# Altium footprint library Package_BGA.PcbLib: 230 footprints (part 11 of 28)
Each footprint in its own frame and in the unit in brackets; x right, y up, seen from the top. Pads: shape width x height; smd on the part's side, far side on the other; paste and mask are expansions set on the pad; w line width, h text height; cw(c..) or ccw(c..) is an arc to the next point about the centre after c.
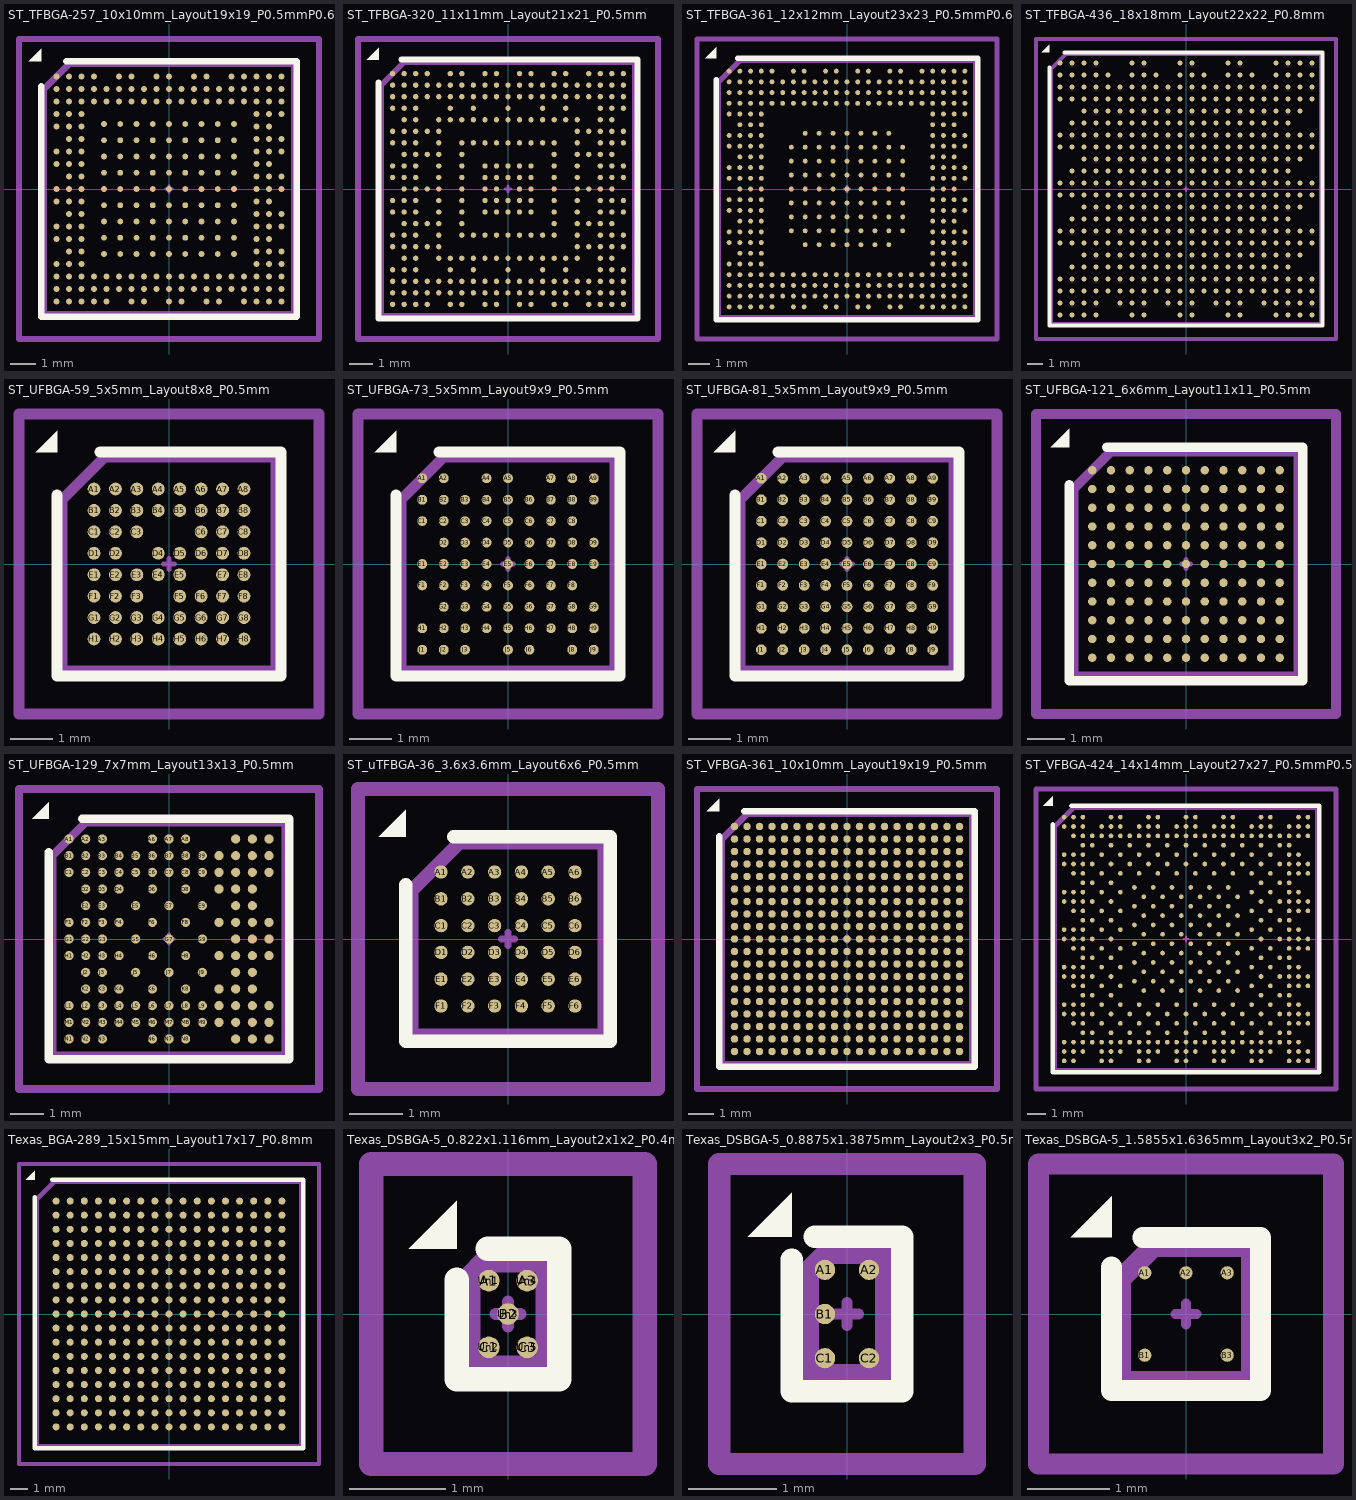
[diagram p10: the footprints below, top view; thin cyan lines are the x and y axes]

## ST_TFBGA-257_10x10mm_Layout19x19_P0.5mmP0.65mm [mm] "ST_TFBGA-257_10x10mm_Layout19x19_P0.5mmP0.65mm"
pads (257):
  round 0.23 smd: 1A1(-2.6,2.6) 1A2(-1.95,2.6) 1A3(-1.3,2.6) 1A4(-0.65,2.6) 1A5(0,2.6) 1A6(0.65,2.6) 1A7(1.3,2.6) 1A8(1.95,2.6) 1A9(2.6,2.6) 1B1(-2.6,1.95) 1B2(-1.95,1.95) 1B3(-1.3,1.95) 1B4(-0.65,1.95) 1B5(0,1.95) 1B6(0.65,1.95) 1B7(1.3,1.95) 1B8(1.95,1.95) 1B9(2.6,1.95) 1C1(-2.6,1.3) 1C2(-1.95,1.3) 1C3(-1.3,1.3) 1C4(-0.65,1.3) 1C5(0,1.3) 1C6(0.65,1.3) 1C7(1.3,1.3) 1C8(1.95,1.3) 1C9(2.6,1.3) 1D1(-2.6,0.65) 1D2(-1.95,0.65) 1D3(-1.3,0.65) 1D4(-0.65,0.65) 1D5(0,0.65) 1D6(0.65,0.65) 1D7(1.3,0.65) 1D8(1.95,0.65) 1D9(2.6,0.65) 1E1(-2.6,0) 1E2(-1.95,0) 1E3(-1.3,0) 1E4(-0.65,0) 1E5(0,0) 1E6(0.65,0) 1E7(1.3,0) 1E8(1.95,0) 1E9(2.6,0) 1F1(-2.6,-0.65) 1F2(-1.95,-0.65) 1F3(-1.3,-0.65) 1F4(-0.65,-0.65) 1F5(0,-0.65) 1F6(0.65,-0.65) 1F7(1.3,-0.65) 1F8(1.95,-0.65) 1F9(2.6,-0.65) 1G1(-2.6,-1.3) 1G2(-1.95,-1.3) 1G3(-1.3,-1.3) 1G4(-0.65,-1.3) 1G5(0,-1.3) 1G6(0.65,-1.3) 1G7(1.3,-1.3) 1G8(1.95,-1.3) 1G9(2.6,-1.3) 1H1(-2.6,-1.95) 1H2(-1.95,-1.95) 1H3(-1.3,-1.95) 1H4(-0.65,-1.95) 1H5(0,-1.95) 1H6(0.65,-1.95) 1H7(1.3,-1.95) 1H8(1.95,-1.95) 1H9(2.6,-1.95) 1J1(-2.6,-2.6) 1J2(-1.95,-2.6) 1J3(-1.3,-2.6) 1J4(-0.65,-2.6) 1J5(0,-2.6) 1J6(0.65,-2.6) 1J7(1.3,-2.6) 1J8(1.95,-2.6) 1J9(2.6,-2.6) A1(-4.5,4.5) A2(-4,4.5) A3(-3.5,4.5) A4(-3,4.5) A6(-2,4.5) A7(-1.5,4.5) A9(-0.5,4.5) A10(0,4.5) A12(1,4.5) A13(1.5,4.5) A15(2.5,4.5) A16(3,4.5) A17(3.5,4.5) A18(4,4.5) A19(4.5,4.5) B1(-4.5,4) B2(-4,4) B3(-3.5,4) B4(-3,4) B5(-2.5,4) B6(-2,4) B7(-1.5,4) B8(-1,4) B9(-0.5,4) B10(0,4) B11(0.5,4) B12(1,4) B13(1.5,4) B14(2,4) B15(2.5,4) B16(3,4) B17(3.5,4) B18(4,4) B19(4.5,4) C1(-4.5,3.5) C2(-4,3.5) C3(-3.5,3.5) C4(-3,3.5) C5(-2.5,3.5) C6(-2,3.5) C7(-1.5,3.5) C8(-1,3.5) C9(-0.5,3.5) C10(0,3.5) C11(0.5,3.5) C12(1,3.5) C13(1.5,3.5) C14(2,3.5) C15(2.5,3.5) C16(3,3.5) C17(3.5,3.5) C18(4,3.5) C19(4.5,3.5) D1(-4.5,3) D2(-4,3) D3(-3.5,3) D17(3.5,3) D18(4,3) D19(4.5,3) E1(-4.5,2.5) E2(-4,2.5) E3(-3.5,2.5) E17(3.5,2.5) E18(4,2.5) F2(-4,2) F3(-3.5,2) F17(3.5,2) F18(4,2) F19(4.5,2) G1(-4.5,1.5) G2(-4,1.5) G3(-3.5,1.5) G17(3.5,1.5) G18(4,1.5) G19(4.5,1.5) H1(-4.5,1) H2(-4,1) H3(-3.5,1) H17(3.5,1) H18(4,1) J2(-4,0.5) J3(-3.5,0.5) J17(3.5,0.5) J18(4,0.5) J19(4.5,0.5) K1(-4.5,0) K2(-4,0) K3(-3.5,0) K17(3.5,0) K18(4,0) K19(4.5,0) L1(-4.5,-0.5) L2(-4,-0.5) L3(-3.5,-0.5) L17(3.5,-0.5) L18(4,-0.5) M2(-4,-1) M3(-3.5,-1) M17(3.5,-1) M18(4,-1) M19(4.5,-1) N1(-4.5,-1.5) N2(-4,-1.5) N3(-3.5,-1.5) N17(3.5,-1.5) N18(4,-1.5) N19(4.5,-1.5) P1(-4.5,-2) P2(-4,-2) P3(-3.5,-2) P17(3.5,-2) P18(4,-2) R2(-4,-2.5) R3(-3.5,-2.5) R17(3.5,-2.5) R18(4,-2.5) R19(4.5,-2.5) T1(-4.5,-3) T2(-4,-3) T3(-3.5,-3) T17(3.5,-3) T18(4,-3) T19(4.5,-3) U1(-4.5,-3.5) U2(-4,-3.5) U3(-3.5,-3.5) U4(-3,-3.5) U5(-2.5,-3.5) U6(-2,-3.5) U7(-1.5,-3.5) U8(-1,-3.5) U9(-0.5,-3.5) U10(0,-3.5) U11(0.5,-3.5) U12(1,-3.5) U13(1.5,-3.5) U14(2,-3.5) U15(2.5,-3.5) U16(3,-3.5) U17(3.5,-3.5) U18(4,-3.5) U19(4.5,-3.5) V1(-4.5,-4) V2(-4,-4) V3(-3.5,-4) V4(-3,-4) V5(-2.5,-4) V6(-2,-4) V7(-1.5,-4) V8(-1,-4) V9(-0.5,-4) V10(0,-4) V11(0.5,-4) V12(1,-4) V13(1.5,-4) V14(2,-4) V15(2.5,-4) V16(3,-4) V17(3.5,-4) V18(4,-4) V19(4.5,-4) W1(-4.5,-4.5) W2(-4,-4.5) W3(-3.5,-4.5) W4(-3,-4.5) W5(-2.5,-4.5) W7(-1.5,-4.5) W8(-1,-4.5) W10(0,-4.5) W11(0.5,-4.5) W13(1.5,-4.5) W14(2,-4.5) W16(3,-4.5) W17(3.5,-4.5) W18(4,-4.5) W19(4.5,-4.5)
F.SilkS:
  region: -5.11,5.11 -5.61,5.11 -5.11,5.61
  lines w0.254: -5.11,4.11 -5.11,-5.11 5.11,-5.11 5.11,5.11 -4.11,5.11
Top Component Center:
  lines w0.127: -0.127,0 0.127,0 -0.127,0 ; 0,-0.127 0,0.127 0,-0.127
Top Assembly:
  lines w0.254: -5,-5 -5,4 -4,5 5,5 5,-5 -5,-5
Top Courtyard:
  lines w0.254: -6,-6 -6,6 6,6 6,-6 -6,-6
Top Designator:
  text ".Designator" at -3.432,-0.345 h1.52

## ST_TFBGA-320_11x11mm_Layout21x21_P0.5mm [mm] "ST_TFBGA-320_11x11mm_Layout21x21_P0.5mm"
pads (320):
  round 0.23 smd: A1(-5,5) A2(-4.5,5) A3(-4,5) A4(-3.5,5) A6(-2.5,5) A7(-2,5) A9(-1,5) A10(-0.5,5) A12(0.5,5) A13(1,5) A15(2,5) A16(2.5,5) A18(3.5,5) A19(4,5) A20(4.5,5) A21(5,5) AA1(-5,-5) AA2(-4.5,-5) AA3(-4,-5) AA4(-3.5,-5) AA6(-2.5,-5) AA7(-2,-5) AA9(-1,-5) AA10(-0.5,-5) AA12(0.5,-5) AA13(1,-5) AA15(2,-5) AA16(2.5,-5) AA18(3.5,-5) AA19(4,-5) AA20(4.5,-5) AA21(5,-5) B1(-5,4.5) B2(-4.5,4.5) B3(-4,4.5) B4(-3.5,4.5) B5(-3,4.5) B6(-2.5,4.5) B7(-2,4.5) B8(-1.5,4.5) B9(-1,4.5) B10(-0.5,4.5) B11(0,4.5) B12(0.5,4.5) B13(1,4.5) B14(1.5,4.5) B15(2,4.5) B16(2.5,4.5) B17(3,4.5) B18(3.5,4.5) B19(4,4.5) B20(4.5,4.5) B21(5,4.5) C1(-5,4) C2(-4.5,4) C3(-4,4) C4(-3.5,4) C5(-3,4) C6(-2.5,4) C7(-2,4) C8(-1.5,4) C9(-1,4) C10(-0.5,4) C11(0,4) C12(0.5,4) C13(1,4) C14(1.5,4) C15(2,4) C16(2.5,4) C17(3,4) C18(3.5,4) C19(4,4) C20(4.5,4) C21(5,4) D1(-5,3.5) D2(-4.5,3.5) D3(-4,3.5) D6(-2.5,3.5) D8(-1.5,3.5) D11(0,3.5) D14(1.5,3.5) D16(2.5,3.5) D19(4,3.5) D20(4.5,3.5) D21(5,3.5) E2(-4.5,3) E3(-4,3) E5(-3,3) E6(-2.5,3) E7(-2,3) E8(-1.5,3) E9(-1,3) E10(-0.5,3) E11(0,3) E12(0.5,3) E13(1,3) E14(1.5,3) E15(2,3) E16(2.5,3) E17(3,3) E19(4,3) E20(4.5,3) F1(-5,2.5) F2(-4.5,2.5) F3(-4,2.5) F4(-3.5,2.5) F5(-3,2.5) F17(3,2.5) F18(3.5,2.5) F19(4,2.5) F20(4.5,2.5) F21(5,2.5) G1(-5,2) G2(-4.5,2) G3(-4,2) G5(-3,2) G7(-2,2) G8(-1.5,2) G9(-1,2) G10(-0.5,2) G11(0,2) G12(0.5,2) G13(1,2) G14(1.5,2) G15(2,2) G17(3,2) G19(4,2) G20(4.5,2) G21(5,2) H2(-4.5,1.5) H3(-4,1.5) H4(-3.5,1.5) H5(-3,1.5) H7(-2,1.5) H15(2,1.5) H17(3,1.5) H18(3.5,1.5) H19(4,1.5) H20(4.5,1.5) J1(-5,1) J2(-4.5,1) J3(-4,1) J5(-3,1) J7(-2,1) J9(-1,1) J10(-0.5,1) J11(0,1) J12(0.5,1) J13(1,1) J15(2,1) J17(3,1) J19(4,1) J20(4.5,1) J21(5,1) K1(-5,0.5) K2(-4.5,0.5) K3(-4,0.5) K5(-3,0.5) K7(-2,0.5) K9(-1,0.5) K10(-0.5,0.5) K11(0,0.5) K12(0.5,0.5) K13(1,0.5) K15(2,0.5) K17(3,0.5) K19(4,0.5) K20(4.5,0.5) K21(5,0.5) L2(-4.5,0) L3(-4,0) L4(-3.5,0) L5(-3,0) L7(-2,0) L9(-1,0) L10(-0.5,0) L12(0.5,0) L13(1,0) L15(2,0) L17(3,0) L18(3.5,0) L19(4,0) L20(4.5,0) M1(-5,-0.5) M2(-4.5,-0.5) M3(-4,-0.5) M5(-3,-0.5) M7(-2,-0.5) M9(-1,-0.5) M10(-0.5,-0.5) M11(0,-0.5) M12(0.5,-0.5) M13(1,-0.5) M15(2,-0.5) M17(3,-0.5) M19(4,-0.5) M20(4.5,-0.5) M21(5,-0.5) N1(-5,-1) N2(-4.5,-1) N3(-4,-1) N5(-3,-1) N7(-2,-1) N9(-1,-1) N10(-0.5,-1) N11(0,-1) N12(0.5,-1) N13(1,-1) N15(2,-1) N17(3,-1) N19(4,-1) N20(4.5,-1) N21(5,-1) P2(-4.5,-1.5) P3(-4,-1.5) P4(-3.5,-1.5) P5(-3,-1.5) P7(-2,-1.5) P15(2,-1.5) P17(3,-1.5) P18(3.5,-1.5) P19(4,-1.5) P20(4.5,-1.5) R1(-5,-2) R2(-4.5,-2) R3(-4,-2) R5(-3,-2) R7(-2,-2) R8(-1.5,-2) R9(-1,-2) R10(-0.5,-2) R11(0,-2) R12(0.5,-2) R13(1,-2) R14(1.5,-2) R15(2,-2) R17(3,-2) R19(4,-2) R20(4.5,-2) R21(5,-2) T1(-5,-2.5) T2(-4.5,-2.5) T3(-4,-2.5) T4(-3.5,-2.5) T5(-3,-2.5) T17(3,-2.5) T18(3.5,-2.5) T19(4,-2.5) T20(4.5,-2.5) T21(5,-2.5) U2(-4.5,-3) U3(-4,-3) U5(-3,-3) U6(-2.5,-3) U7(-2,-3) U8(-1.5,-3) U9(-1,-3) U10(-0.5,-3) U11(0,-3) U12(0.5,-3) U13(1,-3) U14(1.5,-3) U15(2,-3) U16(2.5,-3) U17(3,-3) U19(4,-3) U20(4.5,-3) V1(-5,-3.5) V2(-4.5,-3.5) V3(-4,-3.5) V6(-2.5,-3.5) V8(-1.5,-3.5) V11(0,-3.5) V14(1.5,-3.5) V16(2.5,-3.5) V19(4,-3.5) V20(4.5,-3.5) V21(5,-3.5) W1(-5,-4) W2(-4.5,-4) W3(-4,-4) W4(-3.5,-4) W5(-3,-4) W6(-2.5,-4) W7(-2,-4) W8(-1.5,-4) W9(-1,-4) W10(-0.5,-4) W11(0,-4) W12(0.5,-4) W13(1,-4) W14(1.5,-4) W15(2,-4) W16(2.5,-4) W17(3,-4) W18(3.5,-4) W19(4,-4) W20(4.5,-4) W21(5,-4) Y1(-5,-4.5) Y2(-4.5,-4.5) Y3(-4,-4.5) Y4(-3.5,-4.5) Y5(-3,-4.5) Y6(-2.5,-4.5) Y7(-2,-4.5) Y8(-1.5,-4.5) Y9(-1,-4.5) Y10(-0.5,-4.5) Y11(0,-4.5) Y12(0.5,-4.5) Y13(1,-4.5) Y14(1.5,-4.5) Y15(2,-4.5) Y16(2.5,-4.5) Y17(3,-4.5) Y18(3.5,-4.5) Y19(4,-4.5) Y20(4.5,-4.5) Y21(5,-4.5)
F.SilkS:
  region: -5.61,5.61 -6.11,5.61 -5.61,6.11
  lines w0.254: -5.61,4.61 -5.61,-5.61 5.61,-5.61 5.61,5.61 -4.61,5.61
Top Component Center:
  lines w0.127: -0.127,0 0.127,0 -0.127,0 ; 0,-0.127 0,0.127 0,-0.127
Top Assembly:
  lines w0.254: -5.5,-5.5 -5.5,4.5 -4.5,5.5 5.5,5.5 5.5,-5.5 -5.5,-5.5
Top Courtyard:
  lines w0.254: -6.5,-6.5 -6.5,6.5 6.5,6.5 6.5,-6.5 -6.5,-6.5
Top Designator:
  text ".Designator" at -3.432,-0.345 h1.52

## ST_TFBGA-361_12x12mm_Layout23x23_P0.5mmP0.65mm [mm] "ST_TFBGA-361_12x12mm_Layout23x23_P0.5mmP0.65mm"
pads (361):
  round 0.23 smd: 1A2(-1.95,2.6) 1A3(-1.3,2.6) 1A4(-0.65,2.6) 1A5(0,2.6) 1A6(0.65,2.6) 1A7(1.3,2.6) 1A8(1.95,2.6) 1B1(-2.6,1.95) 1B2(-1.95,1.95) 1B3(-1.3,1.95) 1B4(-0.65,1.95) 1B5(0,1.95) 1B6(0.65,1.95) 1B7(1.3,1.95) 1B8(1.95,1.95) 1B9(2.6,1.95) 1C1(-2.6,1.3) 1C2(-1.95,1.3) 1C3(-1.3,1.3) 1C4(-0.65,1.3) 1C5(0,1.3) 1C6(0.65,1.3) 1C7(1.3,1.3) 1C8(1.95,1.3) 1C9(2.6,1.3) 1D1(-2.6,0.65) 1D2(-1.95,0.65) 1D3(-1.3,0.65) 1D4(-0.65,0.65) 1D5(0,0.65) 1D6(0.65,0.65) 1D7(1.3,0.65) 1D8(1.95,0.65) 1D9(2.6,0.65) 1E1(-2.6,0) 1E2(-1.95,0) 1E3(-1.3,0) 1E4(-0.65,0) 1E5(0,0) 1E6(0.65,0) 1E7(1.3,0) 1E8(1.95,0) 1E9(2.6,0) 1F1(-2.6,-0.65) 1F2(-1.95,-0.65) 1F3(-1.3,-0.65) 1F4(-0.65,-0.65) 1F5(0,-0.65) 1F6(0.65,-0.65) 1F7(1.3,-0.65) 1F8(1.95,-0.65) 1F9(2.6,-0.65) 1G1(-2.6,-1.3) 1G2(-1.95,-1.3) 1G3(-1.3,-1.3) 1G4(-0.65,-1.3) 1G5(0,-1.3) 1G6(0.65,-1.3) 1G7(1.3,-1.3) 1G8(1.95,-1.3) 1G9(2.6,-1.3) 1H1(-2.6,-1.95) 1H2(-1.95,-1.95) 1H3(-1.3,-1.95) 1H4(-0.65,-1.95) 1H5(0,-1.95) 1H6(0.65,-1.95) 1H7(1.3,-1.95) 1H8(1.95,-1.95) 1H9(2.6,-1.95) 1J2(-1.95,-2.6) 1J3(-1.3,-2.6) 1J4(-0.65,-2.6) 1J5(0,-2.6) 1J6(0.65,-2.6) 1J7(1.3,-2.6) 1J8(1.95,-2.6) A1(-5.5,5.5) A2(-5,5.5) A3(-4.5,5.5) A4(-4,5.5) A5(-3.5,5.5) A7(-2.5,5.5) A8(-2,5.5) A10(-1,5.5) A11(-0.5,5.5) A13(0.5,5.5) A14(1,5.5) A16(2,5.5) A17(2.5,5.5) A19(3.5,5.5) A20(4,5.5) A21(4.5,5.5) A22(5,5.5) A23(5.5,5.5) AA1(-5.5,-4.5) AA2(-5,-4.5) AA3(-4.5,-4.5) AA4(-4,-4.5) AA5(-3.5,-4.5) AA6(-3,-4.5) AA7(-2.5,-4.5) AA8(-2,-4.5) AA9(-1.5,-4.5) AA10(-1,-4.5) AA11(-0.5,-4.5) AA12(0,-4.5) AA13(0.5,-4.5) AA14(1,-4.5) AA15(1.5,-4.5) AA16(2,-4.5) AA17(2.5,-4.5) AA18(3,-4.5) AA19(3.5,-4.5) AA20(4,-4.5) AA21(4.5,-4.5) AA22(5,-4.5) AA23(5.5,-4.5) AB1(-5.5,-5) AB2(-5,-5) AB3(-4.5,-5) AB4(-4,-5) AB5(-3.5,-5) AB6(-3,-5) AB7(-2.5,-5) AB8(-2,-5) AB9(-1.5,-5) AB10(-1,-5) AB11(-0.5,-5) AB12(0,-5) AB13(0.5,-5) AB14(1,-5) AB15(1.5,-5) AB16(2,-5) AB17(2.5,-5) AB18(3,-5) AB19(3.5,-5) AB20(4,-5) AB21(4.5,-5) AB22(5,-5) AB23(5.5,-5) AC1(-5.5,-5.5) AC2(-5,-5.5) AC3(-4.5,-5.5) AC4(-4,-5.5) AC5(-3.5,-5.5) AC7(-2.5,-5.5) AC8(-2,-5.5) AC10(-1,-5.5) AC11(-0.5,-5.5) AC13(0.5,-5.5) AC14(1,-5.5) AC16(2,-5.5) AC17(2.5,-5.5) AC19(3.5,-5.5) AC20(4,-5.5) AC21(4.5,-5.5) AC22(5,-5.5) AC23(5.5,-5.5) B1(-5.5,5) B2(-5,5) B3(-4.5,5) B4(-4,5) B5(-3.5,5) B6(-3,5) B7(-2.5,5) B8(-2,5) B9(-1.5,5) B10(-1,5) B11(-0.5,5) B12(0,5) B13(0.5,5) B14(1,5) B15(1.5,5) B16(2,5) B17(2.5,5) B18(3,5) B19(3.5,5) B20(4,5) B21(4.5,5) B22(5,5) B23(5.5,5) C1(-5.5,4.5) C2(-5,4.5) C3(-4.5,4.5) C4(-4,4.5) C5(-3.5,4.5) C6(-3,4.5) C7(-2.5,4.5) C8(-2,4.5) C9(-1.5,4.5) C10(-1,4.5) C11(-0.5,4.5) C12(0,4.5) C13(0.5,4.5) C14(1,4.5) C15(1.5,4.5) C16(2,4.5) C17(2.5,4.5) C18(3,4.5) C19(3.5,4.5) C20(4,4.5) C21(4.5,4.5) C22(5,4.5) C23(5.5,4.5) D1(-5.5,4) D2(-5,4) D3(-4.5,4) D4(-4,4) D5(-3.5,4) D6(-3,4) D7(-2.5,4) D8(-2,4) D9(-1.5,4) D10(-1,4) D11(-0.5,4) D12(0,4) D13(0.5,4) D14(1,4) D15(1.5,4) D16(2,4) D17(2.5,4) D18(3,4) D19(3.5,4) D20(4,4) D21(4.5,4) D22(5,4) D23(5.5,4) E1(-5.5,3.5) E2(-5,3.5) E3(-4.5,3.5) E4(-4,3.5) E20(4,3.5) E21(4.5,3.5) E22(5,3.5) E23(5.5,3.5) F2(-5,3) F3(-4.5,3) F4(-4,3) F20(4,3) F21(4.5,3) F22(5,3) G1(-5.5,2.5) G2(-5,2.5) G3(-4.5,2.5) G4(-4,2.5) G20(4,2.5) G21(4.5,2.5) G22(5,2.5) G23(5.5,2.5) H1(-5.5,2) H2(-5,2) H3(-4.5,2) H4(-4,2) H20(4,2) H21(4.5,2) H22(5,2) H23(5.5,2) J2(-5,1.5) J3(-4.5,1.5) J4(-4,1.5) J20(4,1.5) J21(4.5,1.5) J22(5,1.5) K1(-5.5,1) K2(-5,1) K3(-4.5,1) K4(-4,1) K20(4,1) K21(4.5,1) K22(5,1) K23(5.5,1) L1(-5.5,0.5) L2(-5,0.5) L3(-4.5,0.5) L4(-4,0.5) L20(4,0.5) L21(4.5,0.5) L22(5,0.5) L23(5.5,0.5) M2(-5,0) M3(-4.5,0) M4(-4,0) M20(4,0) M21(4.5,0) M22(5,0) N1(-5.5,-0.5) N2(-5,-0.5) N3(-4.5,-0.5) N4(-4,-0.5) N20(4,-0.5) N21(4.5,-0.5) N22(5,-0.5) N23(5.5,-0.5) P1(-5.5,-1) P2(-5,-1) P3(-4.5,-1) P4(-4,-1) P20(4,-1) P21(4.5,-1) P22(5,-1) P23(5.5,-1) R2(-5,-1.5) R3(-4.5,-1.5) R4(-4,-1.5) R20(4,-1.5) R21(4.5,-1.5) R22(5,-1.5) T1(-5.5,-2) T2(-5,-2) T3(-4.5,-2) T4(-4,-2) T20(4,-2) T21(4.5,-2) T22(5,-2) T23(5.5,-2) U1(-5.5,-2.5) U2(-5,-2.5) U3(-4.5,-2.5) U4(-4,-2.5) U20(4,-2.5) U21(4.5,-2.5) U22(5,-2.5) U23(5.5,-2.5) V2(-5,-3) V3(-4.5,-3) V4(-4,-3) V20(4,-3) V21(4.5,-3) V22(5,-3) W1(-5.5,-3.5) W2(-5,-3.5) W3(-4.5,-3.5) W4(-4,-3.5) W20(4,-3.5) W21(4.5,-3.5) W22(5,-3.5) W23(5.5,-3.5) Y1(-5.5,-4) Y2(-5,-4) Y3(-4.5,-4) Y4(-4,-4) Y5(-3.5,-4) Y6(-3,-4) Y7(-2.5,-4) Y8(-2,-4) Y9(-1.5,-4) Y10(-1,-4) Y11(-0.5,-4) Y12(0,-4) Y13(0.5,-4) Y14(1,-4) Y15(1.5,-4) Y16(2,-4) Y17(2.5,-4) Y18(3,-4) Y19(3.5,-4) Y20(4,-4) Y21(4.5,-4) Y22(5,-4) Y23(5.5,-4)
F.SilkS:
  region: -6.11,6.11 -6.61,6.11 -6.11,6.61
  lines w0.254: -6.11,5.11 -6.11,-6.11 6.11,-6.11 6.11,6.11 -5.11,6.11
Top Component Center:
  lines w0.127: -0.127,0 0.127,0 -0.127,0 ; 0,-0.127 0,0.127 0,-0.127
Top Assembly:
  lines w0.254: -6,-6 -6,5 -5,6 6,6 6,-6 -6,-6
Top Courtyard:
  lines w0.254: -7,-7 -7,7 7,7 7,-7 -7,-7
Top Designator:
  text ".Designator" at -3.432,-0.345 h1.52

## ST_TFBGA-436_18x18mm_Layout22x22_P0.8mm [mm] "ST_TFBGA-436_18x18mm_Layout22x22_P0.8mm"
pads (436):
  round 0.32 smd: A1(-8.4,8.4) A2(-7.6,8.4) A3(-6.8,8.4) A4(-6,8.4) A7(-3.6,8.4) A8(-2.8,8.4) A11(-0.4,8.4) A12(0.4,8.4) A15(2.8,8.4) A16(3.6,8.4) A19(6,8.4) A20(6.8,8.4) A21(7.6,8.4) A22(8.4,8.4) AA1(-8.4,-7.6) AA2(-7.6,-7.6) AA3(-6.8,-7.6) AA4(-6,-7.6) AA6(-4.4,-7.6) AA7(-3.6,-7.6) AA8(-2.8,-7.6) AA10(-1.2,-7.6) AA11(-0.4,-7.6) AA12(0.4,-7.6) AA14(2,-7.6) AA15(2.8,-7.6) AA16(3.6,-7.6) AA18(5.2,-7.6) AA19(6,-7.6) AA20(6.8,-7.6) AA21(7.6,-7.6) AA22(8.4,-7.6) AB1(-8.4,-8.4) AB2(-7.6,-8.4) AB3(-6.8,-8.4) AB4(-6,-8.4) AB7(-3.6,-8.4) AB8(-2.8,-8.4) AB11(-0.4,-8.4) AB12(0.4,-8.4) AB15(2.8,-8.4) AB16(3.6,-8.4) AB19(6,-8.4) AB20(6.8,-8.4) AB21(7.6,-8.4) AB22(8.4,-8.4) B1(-8.4,7.6) B2(-7.6,7.6) B3(-6.8,7.6) B4(-6,7.6) B5(-5.2,7.6) B7(-3.6,7.6) B8(-2.8,7.6) B9(-2,7.6) B11(-0.4,7.6) B12(0.4,7.6) B13(1.2,7.6) B15(2.8,7.6) B16(3.6,7.6) B17(4.4,7.6) B19(6,7.6) B20(6.8,7.6) B21(7.6,7.6) B22(8.4,7.6) C1(-8.4,6.8) C2(-7.6,6.8) C3(-6.8,6.8) C4(-6,6.8) C5(-5.2,6.8) C6(-4.4,6.8) C7(-3.6,6.8) C8(-2.8,6.8) C9(-2,6.8) C10(-1.2,6.8) C11(-0.4,6.8) C12(0.4,6.8) C13(1.2,6.8) C14(2,6.8) C15(2.8,6.8) C16(3.6,6.8) C17(4.4,6.8) C18(5.2,6.8) C19(6,6.8) C20(6.8,6.8) C21(7.6,6.8) C22(8.4,6.8) D1(-8.4,6) D2(-7.6,6) D3(-6.8,6) D4(-6,6) D5(-5.2,6) D6(-4.4,6) D7(-3.6,6) D8(-2.8,6) D9(-2,6) D10(-1.2,6) D11(-0.4,6) D12(0.4,6) D13(1.2,6) D14(2,6) D15(2.8,6) D16(3.6,6) D17(4.4,6) D18(5.2,6) D19(6,6) D20(6.8,6) D21(7.6,6) D22(8.4,6) E3(-6.8,5.2) E4(-6,5.2) E5(-5.2,5.2) E6(-4.4,5.2) E7(-3.6,5.2) E8(-2.8,5.2) E9(-2,5.2) E10(-1.2,5.2) E11(-0.4,5.2) E12(0.4,5.2) E13(1.2,5.2) E14(2,5.2) E15(2.8,5.2) E16(3.6,5.2) E17(4.4,5.2) E18(5.2,5.2) E19(6,5.2) E20(6.8,5.2) E21(7.6,5.2) F2(-7.6,4.4) F3(-6.8,4.4) F4(-6,4.4) F5(-5.2,4.4) F6(-4.4,4.4) F7(-3.6,4.4) F8(-2.8,4.4) F9(-2,4.4) F10(-1.2,4.4) F11(-0.4,4.4) F12(0.4,4.4) F13(1.2,4.4) F14(2,4.4) F15(2.8,4.4) F16(3.6,4.4) F17(4.4,4.4) F18(5.2,4.4) F19(6,4.4) F20(6.8,4.4) G1(-8.4,3.6) G2(-7.6,3.6) G3(-6.8,3.6) G4(-6,3.6) G5(-5.2,3.6) G6(-4.4,3.6) G7(-3.6,3.6) G8(-2.8,3.6) G9(-2,3.6) G10(-1.2,3.6) G11(-0.4,3.6) G12(0.4,3.6) G13(1.2,3.6) G14(2,3.6) G15(2.8,3.6) G16(3.6,3.6) G17(4.4,3.6) G18(5.2,3.6) G19(6,3.6) G20(6.8,3.6) G21(7.6,3.6) G22(8.4,3.6) H1(-8.4,2.8) H2(-7.6,2.8) H3(-6.8,2.8) H4(-6,2.8) H5(-5.2,2.8) H6(-4.4,2.8) H7(-3.6,2.8) H8(-2.8,2.8) H9(-2,2.8) H10(-1.2,2.8) H11(-0.4,2.8) H12(0.4,2.8) H13(1.2,2.8) H14(2,2.8) H15(2.8,2.8) H16(3.6,2.8) H17(4.4,2.8) H18(5.2,2.8) H19(6,2.8) H20(6.8,2.8) H21(7.6,2.8) H22(8.4,2.8) J3(-6.8,2) J4(-6,2) J5(-5.2,2) J6(-4.4,2) J7(-3.6,2) J8(-2.8,2) J9(-2,2) J10(-1.2,2) J11(-0.4,2) J12(0.4,2) J13(1.2,2) J14(2,2) J15(2.8,2) J16(3.6,2) J17(4.4,2) J18(5.2,2) J19(6,2) J20(6.8,2) J21(7.6,2) K2(-7.6,1.2) K3(-6.8,1.2) K4(-6,1.2) K5(-5.2,1.2) K6(-4.4,1.2) K7(-3.6,1.2) K8(-2.8,1.2) K9(-2,1.2) K10(-1.2,1.2) K11(-0.4,1.2) K12(0.4,1.2) K13(1.2,1.2) K14(2,1.2) K15(2.8,1.2) K16(3.6,1.2) K17(4.4,1.2) K18(5.2,1.2) K19(6,1.2) K20(6.8,1.2) L1(-8.4,0.4) L2(-7.6,0.4) L3(-6.8,0.4) L4(-6,0.4) L5(-5.2,0.4) L6(-4.4,0.4) L7(-3.6,0.4) L8(-2.8,0.4) L9(-2,0.4) L10(-1.2,0.4) L11(-0.4,0.4) L12(0.4,0.4) L13(1.2,0.4) L14(2,0.4) L15(2.8,0.4) L16(3.6,0.4) L17(4.4,0.4) L18(5.2,0.4) L19(6,0.4) L20(6.8,0.4) L21(7.6,0.4) L22(8.4,0.4) M1(-8.4,-0.4) M2(-7.6,-0.4) M3(-6.8,-0.4) M4(-6,-0.4) M5(-5.2,-0.4) M6(-4.4,-0.4) M7(-3.6,-0.4) M8(-2.8,-0.4) M9(-2,-0.4) M10(-1.2,-0.4) M11(-0.4,-0.4) M12(0.4,-0.4) M13(1.2,-0.4) M14(2,-0.4) M15(2.8,-0.4) M16(3.6,-0.4) M17(4.4,-0.4) M18(5.2,-0.4) M19(6,-0.4) M20(6.8,-0.4) M21(7.6,-0.4) M22(8.4,-0.4) N3(-6.8,-1.2) N4(-6,-1.2) N5(-5.2,-1.2) N6(-4.4,-1.2) N7(-3.6,-1.2) N8(-2.8,-1.2) N9(-2,-1.2) N10(-1.2,-1.2) N11(-0.4,-1.2) N12(0.4,-1.2) N13(1.2,-1.2) N14(2,-1.2) N15(2.8,-1.2) N16(3.6,-1.2) N17(4.4,-1.2) N18(5.2,-1.2) N19(6,-1.2) N20(6.8,-1.2) N21(7.6,-1.2) P2(-7.6,-2) P3(-6.8,-2) P4(-6,-2) P5(-5.2,-2) P6(-4.4,-2) P7(-3.6,-2) P8(-2.8,-2) P9(-2,-2) P10(-1.2,-2) P11(-0.4,-2) P12(0.4,-2) P13(1.2,-2) P14(2,-2) P15(2.8,-2) P16(3.6,-2) P17(4.4,-2) P18(5.2,-2) P19(6,-2) P20(6.8,-2) R1(-8.4,-2.8) R2(-7.6,-2.8) R3(-6.8,-2.8) R4(-6,-2.8) R5(-5.2,-2.8) R6(-4.4,-2.8) R7(-3.6,-2.8) R8(-2.8,-2.8) R9(-2,-2.8) R10(-1.2,-2.8) R11(-0.4,-2.8) R12(0.4,-2.8) R13(1.2,-2.8) R14(2,-2.8) R15(2.8,-2.8) R16(3.6,-2.8) R17(4.4,-2.8) R18(5.2,-2.8) R19(6,-2.8) R20(6.8,-2.8) R21(7.6,-2.8) R22(8.4,-2.8) T1(-8.4,-3.6) T2(-7.6,-3.6) T3(-6.8,-3.6) T4(-6,-3.6) T5(-5.2,-3.6) T6(-4.4,-3.6) T7(-3.6,-3.6) T8(-2.8,-3.6) T9(-2,-3.6) T10(-1.2,-3.6) T11(-0.4,-3.6) T12(0.4,-3.6) T13(1.2,-3.6) T14(2,-3.6) T15(2.8,-3.6) T16(3.6,-3.6) T17(4.4,-3.6) T18(5.2,-3.6) T19(6,-3.6) T20(6.8,-3.6) T21(7.6,-3.6) T22(8.4,-3.6) U3(-6.8,-4.4) U4(-6,-4.4) U5(-5.2,-4.4) U6(-4.4,-4.4) U7(-3.6,-4.4) U8(-2.8,-4.4) U9(-2,-4.4) U10(-1.2,-4.4) U11(-0.4,-4.4) U12(0.4,-4.4) U13(1.2,-4.4) U14(2,-4.4) U15(2.8,-4.4) U16(3.6,-4.4) U17(4.4,-4.4) U18(5.2,-4.4) U19(6,-4.4) U20(6.8,-4.4) U21(7.6,-4.4) V2(-7.6,-5.2) V3(-6.8,-5.2) V4(-6,-5.2) V5(-5.2,-5.2) V6(-4.4,-5.2) V7(-3.6,-5.2) V8(-2.8,-5.2) V9(-2,-5.2) V10(-1.2,-5.2) V11(-0.4,-5.2) V12(0.4,-5.2) V13(1.2,-5.2) V14(2,-5.2) V15(2.8,-5.2) V16(3.6,-5.2) V17(4.4,-5.2) V18(5.2,-5.2) V19(6,-5.2) V20(6.8,-5.2) W1(-8.4,-6) W2(-7.6,-6) W3(-6.8,-6) W4(-6,-6) W5(-5.2,-6) W6(-4.4,-6) W7(-3.6,-6) W8(-2.8,-6) W9(-2,-6) W10(-1.2,-6) W11(-0.4,-6) W12(0.4,-6) W13(1.2,-6) W14(2,-6) W15(2.8,-6) W16(3.6,-6) W17(4.4,-6) W18(5.2,-6) W19(6,-6) W20(6.8,-6) W21(7.6,-6) W22(8.4,-6) Y1(-8.4,-6.8) Y2(-7.6,-6.8) Y3(-6.8,-6.8) Y4(-6,-6.8) Y5(-5.2,-6.8) Y6(-4.4,-6.8) Y7(-3.6,-6.8) Y8(-2.8,-6.8) Y9(-2,-6.8) Y10(-1.2,-6.8) Y11(-0.4,-6.8) Y12(0.4,-6.8) Y13(1.2,-6.8) Y14(2,-6.8) Y15(2.8,-6.8) Y16(3.6,-6.8) Y17(4.4,-6.8) Y18(5.2,-6.8) Y19(6,-6.8) Y20(6.8,-6.8) Y21(7.6,-6.8) Y22(8.4,-6.8)
F.SilkS:
  region: -9.11,9.11 -9.61,9.11 -9.11,9.61
  lines w0.254: -9.11,8.11 -9.11,-9.11 9.11,-9.11 9.11,9.11 -8.11,9.11
Top Component Center:
  lines w0.127: -0.127,0 0.127,0 -0.127,0 ; 0,-0.127 0,0.127 0,-0.127
Top Assembly:
  lines w0.254: -9,-9 -9,8 -8,9 9,9 9,-9 -9,-9
Top Courtyard:
  lines w0.254: -10,-10 -10,10 10,10 10,-10 -10,-10
Top Designator:
  text ".Designator" at -3.432,-0.345 h1.52

## ST_UFBGA-59_5x5mm_Layout8x8_P0.5mm [mm] "ST_UFBGA-59_5x5mm_Layout8x8_P0.5mm"
pads (59):
  round 0.3 smd: A1(-1.75,1.75) A2(-1.25,1.75) A3(-0.75,1.75) A4(-0.25,1.75) A5(0.25,1.75) A6(0.75,1.75) A7(1.25,1.75) A8(1.75,1.75) B1(-1.75,1.25) B2(-1.25,1.25) B3(-0.75,1.25) B4(-0.25,1.25) B5(0.25,1.25) B6(0.75,1.25) B7(1.25,1.25) B8(1.75,1.25) C1(-1.75,0.75) C2(-1.25,0.75) C3(-0.75,0.75) C6(0.75,0.75) C7(1.25,0.75) C8(1.75,0.75) D1(-1.75,0.25) D2(-1.25,0.25) D4(-0.25,0.25) D5(0.25,0.25) D6(0.75,0.25) D7(1.25,0.25) D8(1.75,0.25) E1(-1.75,-0.25) E2(-1.25,-0.25) E3(-0.75,-0.25) E4(-0.25,-0.25) E5(0.25,-0.25) E7(1.25,-0.25) E8(1.75,-0.25) F1(-1.75,-0.75) F2(-1.25,-0.75) F3(-0.75,-0.75) F5(0.25,-0.75) F6(0.75,-0.75) F7(1.25,-0.75) F8(1.75,-0.75) G1(-1.75,-1.25) G2(-1.25,-1.25) G3(-0.75,-1.25) G4(-0.25,-1.25) G5(0.25,-1.25) G6(0.75,-1.25) G7(1.25,-1.25) G8(1.75,-1.25) H1(-1.75,-1.75) H2(-1.25,-1.75) H3(-0.75,-1.75) H4(-0.25,-1.75) H5(0.25,-1.75) H6(0.75,-1.75) H7(1.25,-1.75) H8(1.75,-1.75)
F.SilkS:
  region: -2.61,2.61 -3.11,2.61 -2.61,3.11
  lines w0.254: -2.61,1.61 -2.61,-2.61 2.61,-2.61 2.61,2.61 -1.61,2.61
Top Component Center:
  lines w0.127: -0.127,0 0.127,0 -0.127,0 ; 0,-0.127 0,0.127 0,-0.127
Top Assembly:
  lines w0.254: -2.5,-2.5 -2.5,1.5 -1.5,2.5 2.5,2.5 2.5,-2.5 -2.5,-2.5
Top Courtyard:
  lines w0.254: -3.5,-3.5 -3.5,3.5 3.5,3.5 3.5,-3.5 -3.5,-3.5
Top Designator:
  text ".Designator" at -3.432,-0.345 h1.52

## ST_UFBGA-73_5x5mm_Layout9x9_P0.5mm [mm] "ST_UFBGA-73_5x5mm_Layout9x9_P0.5mm"
pads (73):
  round 0.23 smd: A1(-2,2) A2(-1.5,2) A4(-0.5,2) A5(0,2) A7(1,2) A8(1.5,2) A9(2,2) B1(-2,1.5) B2(-1.5,1.5) B3(-1,1.5) B4(-0.5,1.5) B5(0,1.5) B6(0.5,1.5) B7(1,1.5) B8(1.5,1.5) B9(2,1.5) C1(-2,1) C2(-1.5,1) C3(-1,1) C4(-0.5,1) C5(0,1) C6(0.5,1) C7(1,1) C8(1.5,1) D2(-1.5,0.5) D3(-1,0.5) D4(-0.5,0.5) D5(0,0.5) D6(0.5,0.5) D7(1,0.5) D8(1.5,0.5) D9(2,0.5) E1(-2,0) E2(-1.5,0) E3(-1,0) E4(-0.5,0) E5(0,0) E6(0.5,0) E7(1,0) E8(1.5,0) E9(2,0) F1(-2,-0.5) F2(-1.5,-0.5) F3(-1,-0.5) F4(-0.5,-0.5) F5(0,-0.5) F6(0.5,-0.5) F7(1,-0.5) F8(1.5,-0.5) G2(-1.5,-1) G3(-1,-1) G4(-0.5,-1) G5(0,-1) G6(0.5,-1) G7(1,-1) G8(1.5,-1) G9(2,-1) H1(-2,-1.5) H2(-1.5,-1.5) H3(-1,-1.5) H4(-0.5,-1.5) H5(0,-1.5) H6(0.5,-1.5) H7(1,-1.5) H8(1.5,-1.5) H9(2,-1.5) J1(-2,-2) J2(-1.5,-2) J3(-1,-2) J5(0,-2) J6(0.5,-2) J8(1.5,-2) J9(2,-2)
F.SilkS:
  region: -2.61,2.61 -3.11,2.61 -2.61,3.11
  lines w0.254: -2.61,1.61 -2.61,-2.61 2.61,-2.61 2.61,2.61 -1.61,2.61
Top Component Center:
  lines w0.127: -0.127,0 0.127,0 -0.127,0 ; 0,-0.127 0,0.127 0,-0.127
Top Assembly:
  lines w0.254: -2.5,-2.5 -2.5,1.5 -1.5,2.5 2.5,2.5 2.5,-2.5 -2.5,-2.5
Top Courtyard:
  lines w0.254: -3.5,-3.5 -3.5,3.5 3.5,3.5 3.5,-3.5 -3.5,-3.5
Top Designator:
  text ".Designator" at -3.432,-0.345 h1.52

## ST_UFBGA-81_5x5mm_Layout9x9_P0.5mm [mm] "ST_UFBGA-81_5x5mm_Layout9x9_P0.5mm"
pads (81):
  round 0.25 smd: A1(-2,2) A2(-1.5,2) A3(-1,2) A4(-0.5,2) A5(0,2) A6(0.5,2) A7(1,2) A8(1.5,2) A9(2,2) B1(-2,1.5) B2(-1.5,1.5) B3(-1,1.5) B4(-0.5,1.5) B5(0,1.5) B6(0.5,1.5) B7(1,1.5) B8(1.5,1.5) B9(2,1.5) C1(-2,1) C2(-1.5,1) C3(-1,1) C4(-0.5,1) C5(0,1) C6(0.5,1) C7(1,1) C8(1.5,1) C9(2,1) D1(-2,0.5) D2(-1.5,0.5) D3(-1,0.5) D4(-0.5,0.5) D5(0,0.5) D6(0.5,0.5) D7(1,0.5) D8(1.5,0.5) D9(2,0.5) E1(-2,0) E2(-1.5,0) E3(-1,0) E4(-0.5,0) E5(0,0) E6(0.5,0) E7(1,0) E8(1.5,0) E9(2,0) F1(-2,-0.5) F2(-1.5,-0.5) F3(-1,-0.5) F4(-0.5,-0.5) F5(0,-0.5) F6(0.5,-0.5) F7(1,-0.5) F8(1.5,-0.5) F9(2,-0.5) G1(-2,-1) G2(-1.5,-1) G3(-1,-1) G4(-0.5,-1) G5(0,-1) G6(0.5,-1) G7(1,-1) G8(1.5,-1) G9(2,-1) H1(-2,-1.5) H2(-1.5,-1.5) H3(-1,-1.5) H4(-0.5,-1.5) H5(0,-1.5) H6(0.5,-1.5) H7(1,-1.5) H8(1.5,-1.5) H9(2,-1.5) J1(-2,-2) J2(-1.5,-2) J3(-1,-2) J4(-0.5,-2) J5(0,-2) J6(0.5,-2) J7(1,-2) J8(1.5,-2) J9(2,-2)
F.SilkS:
  region: -2.61,2.61 -3.11,2.61 -2.61,3.11
  lines w0.254: -2.61,1.61 -2.61,-2.61 2.61,-2.61 2.61,2.61 -1.61,2.61
Top Component Center:
  lines w0.127: -0.127,0 0.127,0 -0.127,0 ; 0,-0.127 0,0.127 0,-0.127
Top Assembly:
  lines w0.254: -2.5,-2.5 -2.5,1.5 -1.5,2.5 2.5,2.5 2.5,-2.5 -2.5,-2.5
Top Courtyard:
  lines w0.254: -3.5,-3.5 -3.5,3.5 3.5,3.5 3.5,-3.5 -3.5,-3.5
Top Designator:
  text ".Designator" at -3.432,-0.345 h1.52

## ST_UFBGA-121_6x6mm_Layout11x11_P0.5mm [mm] "ST_UFBGA-121_6x6mm_Layout11x11_P0.5mm"
pads (121):
  round 0.225 smd: A1(-2.5,2.5) A2(-2,2.5) A3(-1.5,2.5) A4(-1,2.5) A5(-0.5,2.5) A6(0,2.5) A7(0.5,2.5) A8(1,2.5) A9(1.5,2.5) A10(2,2.5) A11(2.5,2.5) B1(-2.5,2) B2(-2,2) B3(-1.5,2) B4(-1,2) B5(-0.5,2) B6(0,2) B7(0.5,2) B8(1,2) B9(1.5,2) B10(2,2) B11(2.5,2) C1(-2.5,1.5) C2(-2,1.5) C3(-1.5,1.5) C4(-1,1.5) C5(-0.5,1.5) C6(0,1.5) C7(0.5,1.5) C8(1,1.5) C9(1.5,1.5) C10(2,1.5) C11(2.5,1.5) D1(-2.5,1) D2(-2,1) D3(-1.5,1) D4(-1,1) D5(-0.5,1) D6(0,1) D7(0.5,1) D8(1,1) D9(1.5,1) D10(2,1) D11(2.5,1) E1(-2.5,0.5) E2(-2,0.5) E3(-1.5,0.5) E4(-1,0.5) E5(-0.5,0.5) E6(0,0.5) E7(0.5,0.5) E8(1,0.5) E9(1.5,0.5) E10(2,0.5) E11(2.5,0.5) F1(-2.5,0) F2(-2,0) F3(-1.5,0) F4(-1,0) F5(-0.5,0) F6(0,0) F7(0.5,0) F8(1,0) F9(1.5,0) F10(2,0) F11(2.5,0) G1(-2.5,-0.5) G2(-2,-0.5) G3(-1.5,-0.5) G4(-1,-0.5) G5(-0.5,-0.5) G6(0,-0.5) G7(0.5,-0.5) G8(1,-0.5) G9(1.5,-0.5) G10(2,-0.5) G11(2.5,-0.5) H1(-2.5,-1) H2(-2,-1) H3(-1.5,-1) H4(-1,-1) H5(-0.5,-1) H6(0,-1) H7(0.5,-1) H8(1,-1) H9(1.5,-1) H10(2,-1) H11(2.5,-1) J1(-2.5,-1.5) J2(-2,-1.5) J3(-1.5,-1.5) J4(-1,-1.5) J5(-0.5,-1.5) J6(0,-1.5) J7(0.5,-1.5) J8(1,-1.5) J9(1.5,-1.5) J10(2,-1.5) J11(2.5,-1.5) K1(-2.5,-2) K2(-2,-2) K3(-1.5,-2) K4(-1,-2) K5(-0.5,-2) K6(0,-2) K7(0.5,-2) K8(1,-2) K9(1.5,-2) K10(2,-2) K11(2.5,-2) L1(-2.5,-2.5) L2(-2,-2.5) L3(-1.5,-2.5) L4(-1,-2.5) L5(-0.5,-2.5) L6(0,-2.5) L7(0.5,-2.5) L8(1,-2.5) L9(1.5,-2.5) L10(2,-2.5) L11(2.5,-2.5)
F.SilkS:
  region: -3.11,3.11 -3.61,3.11 -3.11,3.61
  lines w0.254: -3.11,2.11 -3.11,-3.11 3.11,-3.11 3.11,3.11 -2.11,3.11
Top Component Center:
  lines w0.127: -0.127,0 0.127,0 -0.127,0 ; 0,-0.127 0,0.127 0,-0.127
Top Assembly:
  lines w0.254: -3,-3 -3,2 -2,3 3,3 3,-3 -3,-3
Top Courtyard:
  lines w0.254: -4,-4 -4,4 4,4 4,-4 -4,-4
Top Designator:
  text ".Designator" at -3.432,-0.345 h1.52

## ST_UFBGA-129_7x7mm_Layout13x13_P0.5mm [mm] "ST_UFBGA-129_7x7mm_Layout13x13_P0.5mm"
pads (129):
  round 0.275 smd: A1(-3,3) A2(-2.5,3) A3(-2,3) A6(-0.5,3) A7(0,3) A8(0.5,3) A11(2,3) A12(2.5,3) A13(3,3) B1(-3,2.5) B2(-2.5,2.5) B3(-2,2.5) B4(-1.5,2.5) B5(-1,2.5) B6(-0.5,2.5) B7(0,2.5) B8(0.5,2.5) B9(1,2.5) B10(1.5,2.5) B11(2,2.5) B12(2.5,2.5) B13(3,2.5) C1(-3,2) C2(-2.5,2) C3(-2,2) C4(-1.5,2) C5(-1,2) C6(-0.5,2) C7(0,2) C8(0.5,2) C9(1,2) C10(1.5,2) C11(2,2) C12(2.5,2) C13(3,2) D2(-2.5,1.5) D3(-2,1.5) D4(-1.5,1.5) D6(-0.5,1.5) D8(0.5,1.5) D10(1.5,1.5) D11(2,1.5) D12(2.5,1.5) E2(-2.5,1) E3(-2,1) E5(-1,1) E7(0,1) E9(1,1) E11(2,1) E12(2.5,1) F1(-3,0.5) F2(-2.5,0.5) F3(-2,0.5) F4(-1.5,0.5) F6(-0.5,0.5) F8(0.5,0.5) F10(1.5,0.5) F11(2,0.5) F12(2.5,0.5) F13(3,0.5) G1(-3,0) G2(-2.5,0) G3(-2,0) G5(-1,0) G7(0,0) G9(1,0) G11(2,0) G12(2.5,0) G13(3,0) H1(-3,-0.5) H2(-2.5,-0.5) H3(-2,-0.5) H4(-1.5,-0.5) H6(-0.5,-0.5) H8(0.5,-0.5) H10(1.5,-0.5) H11(2,-0.5) H12(2.5,-0.5) H13(3,-0.5) J2(-2.5,-1) J3(-2,-1) J5(-1,-1) J7(0,-1) J9(1,-1) J11(2,-1) J12(2.5,-1) K2(-2.5,-1.5) K3(-2,-1.5) K4(-1.5,-1.5) K6(-0.5,-1.5) K8(0.5,-1.5) K10(1.5,-1.5) K11(2,-1.5) K12(2.5,-1.5) L1(-3,-2) L2(-2.5,-2) L3(-2,-2) L4(-1.5,-2) L5(-1,-2) L6(-0.5,-2) L7(0,-2) L8(0.5,-2) L9(1,-2) L10(1.5,-2) L11(2,-2) L12(2.5,-2) L13(3,-2) M1(-3,-2.5) M2(-2.5,-2.5) M3(-2,-2.5) M4(-1.5,-2.5) M5(-1,-2.5) M6(-0.5,-2.5) M7(0,-2.5) M8(0.5,-2.5) M9(1,-2.5) M10(1.5,-2.5) M11(2,-2.5) M12(2.5,-2.5) M13(3,-2.5) N1(-3,-3) N2(-2.5,-3) N3(-2,-3) N6(-0.5,-3) N7(0,-3) N8(0.5,-3) N11(2,-3) N12(2.5,-3) N13(3,-3)
F.SilkS:
  region: -3.61,3.61 -4.11,3.61 -3.61,4.11
  lines w0.254: -3.61,2.61 -3.61,-3.61 3.61,-3.61 3.61,3.61 -2.61,3.61
Top Component Center:
  lines w0.127: -0.127,0 0.127,0 -0.127,0 ; 0,-0.127 0,0.127 0,-0.127
Top Assembly:
  lines w0.254: -3.5,-3.5 -3.5,2.5 -2.5,3.5 3.5,3.5 3.5,-3.5 -3.5,-3.5
Top Courtyard:
  lines w0.254: -4.5,-4.5 -4.5,4.5 4.5,4.5 4.5,-4.5 -4.5,-4.5
Top Designator:
  text ".Designator" at -3.432,-0.345 h1.52

## ST_uTFBGA-36_3.6x3.6mm_Layout6x6_P0.5mm [mm] "ST_uTFBGA-36_3.6x3.6mm_Layout6x6_P0.5mm"
pads (36):
  round 0.25 smd: A1(-1.25,1.25) A2(-0.75,1.25) A3(-0.25,1.25) A4(0.25,1.25) A5(0.75,1.25) A6(1.25,1.25) B1(-1.25,0.75) B2(-0.75,0.75) B3(-0.25,0.75) B4(0.25,0.75) B5(0.75,0.75) B6(1.25,0.75) C1(-1.25,0.25) C2(-0.75,0.25) C3(-0.25,0.25) C4(0.25,0.25) C5(0.75,0.25) C6(1.25,0.25) D1(-1.25,-0.25) D2(-0.75,-0.25) D3(-0.25,-0.25) D4(0.25,-0.25) D5(0.75,-0.25) D6(1.25,-0.25) E1(-1.25,-0.75) E2(-0.75,-0.75) E3(-0.25,-0.75) E4(0.25,-0.75) E5(0.75,-0.75) E6(1.25,-0.75) F1(-1.25,-1.25) F2(-0.75,-1.25) F3(-0.25,-1.25) F4(0.25,-1.25) F5(0.75,-1.25) F6(1.25,-1.25)
F.SilkS:
  region: -1.91,1.91 -2.41,1.91 -1.91,2.41
  lines w0.254: -1.91,1.01 -1.91,-1.91 1.91,-1.91 1.91,1.91 -1.01,1.91
Top Component Center:
  lines w0.127: -0.127,0 0.127,0 -0.127,0 ; 0,-0.127 0,0.127 0,-0.127
Top Assembly:
  lines w0.254: -1.8,-1.8 -1.8,0.9 -0.9,1.8 1.8,1.8 1.8,-1.8 -1.8,-1.8
Top Courtyard:
  lines w0.254: -2.8,-2.8 -2.8,2.8 2.8,2.8 2.8,-2.8 -2.8,-2.8
Top Designator:
  text ".Designator" at -3.432,-0.345 h1.52

## ST_VFBGA-361_10x10mm_Layout19x19_P0.5mm [mm] "ST_VFBGA-361_10x10mm_Layout19x19_P0.5mm"
pads (361):
  round 0.3 smd: A1(-4.5,4.5) A2(-4,4.5) A3(-3.5,4.5) A4(-3,4.5) A5(-2.5,4.5) A6(-2,4.5) A7(-1.5,4.5) A8(-1,4.5) A9(-0.5,4.5) A10(0,4.5) A11(0.5,4.5) A12(1,4.5) A13(1.5,4.5) A14(2,4.5) A15(2.5,4.5) A16(3,4.5) A17(3.5,4.5) A18(4,4.5) A19(4.5,4.5) B1(-4.5,4) B2(-4,4) B3(-3.5,4) B4(-3,4) B5(-2.5,4) B6(-2,4) B7(-1.5,4) B8(-1,4) B9(-0.5,4) B10(0,4) B11(0.5,4) B12(1,4) B13(1.5,4) B14(2,4) B15(2.5,4) B16(3,4) B17(3.5,4) B18(4,4) B19(4.5,4) C1(-4.5,3.5) C2(-4,3.5) C3(-3.5,3.5) C4(-3,3.5) C5(-2.5,3.5) C6(-2,3.5) C7(-1.5,3.5) C8(-1,3.5) C9(-0.5,3.5) C10(0,3.5) C11(0.5,3.5) C12(1,3.5) C13(1.5,3.5) C14(2,3.5) C15(2.5,3.5) C16(3,3.5) C17(3.5,3.5) C18(4,3.5) C19(4.5,3.5) D1(-4.5,3) D2(-4,3) D3(-3.5,3) D4(-3,3) D5(-2.5,3) D6(-2,3) D7(-1.5,3) D8(-1,3) D9(-0.5,3) D10(0,3) D11(0.5,3) D12(1,3) D13(1.5,3) D14(2,3) D15(2.5,3) D16(3,3) D17(3.5,3) D18(4,3) D19(4.5,3) E1(-4.5,2.5) E2(-4,2.5) E3(-3.5,2.5) E4(-3,2.5) E5(-2.5,2.5) E6(-2,2.5) E7(-1.5,2.5) E8(-1,2.5) E9(-0.5,2.5) E10(0,2.5) E11(0.5,2.5) E12(1,2.5) E13(1.5,2.5) E14(2,2.5) E15(2.5,2.5) E16(3,2.5) E17(3.5,2.5) E18(4,2.5) E19(4.5,2.5) F1(-4.5,2) F2(-4,2) F3(-3.5,2) F4(-3,2) F5(-2.5,2) F6(-2,2) F7(-1.5,2) F8(-1,2) F9(-0.5,2) F10(0,2) F11(0.5,2) F12(1,2) F13(1.5,2) F14(2,2) F15(2.5,2) F16(3,2) F17(3.5,2) F18(4,2) F19(4.5,2) G1(-4.5,1.5) G2(-4,1.5) G3(-3.5,1.5) G4(-3,1.5) G5(-2.5,1.5) G6(-2,1.5) G7(-1.5,1.5) G8(-1,1.5) G9(-0.5,1.5) G10(0,1.5) G11(0.5,1.5) G12(1,1.5) G13(1.5,1.5) G14(2,1.5) G15(2.5,1.5) G16(3,1.5) G17(3.5,1.5) G18(4,1.5) G19(4.5,1.5) H1(-4.5,1) H2(-4,1) H3(-3.5,1) H4(-3,1) H5(-2.5,1) H6(-2,1) H7(-1.5,1) H8(-1,1) H9(-0.5,1) H10(0,1) H11(0.5,1) H12(1,1) H13(1.5,1) H14(2,1) H15(2.5,1) H16(3,1) H17(3.5,1) H18(4,1) H19(4.5,1) J1(-4.5,0.5) J2(-4,0.5) J3(-3.5,0.5) J4(-3,0.5) J5(-2.5,0.5) J6(-2,0.5) J7(-1.5,0.5) J8(-1,0.5) J9(-0.5,0.5) J10(0,0.5) J11(0.5,0.5) J12(1,0.5) J13(1.5,0.5) J14(2,0.5) J15(2.5,0.5) J16(3,0.5) J17(3.5,0.5) J18(4,0.5) J19(4.5,0.5) K1(-4.5,0) K2(-4,0) K3(-3.5,0) K4(-3,0) K5(-2.5,0) K6(-2,0) K7(-1.5,0) K8(-1,0) K9(-0.5,0) K10(0,0) K11(0.5,0) K12(1,0) K13(1.5,0) K14(2,0) K15(2.5,0) K16(3,0) K17(3.5,0) K18(4,0) K19(4.5,0) L1(-4.5,-0.5) L2(-4,-0.5) L3(-3.5,-0.5) L4(-3,-0.5) L5(-2.5,-0.5) L6(-2,-0.5) L7(-1.5,-0.5) L8(-1,-0.5) L9(-0.5,-0.5) L10(0,-0.5) L11(0.5,-0.5) L12(1,-0.5) L13(1.5,-0.5) L14(2,-0.5) L15(2.5,-0.5) L16(3,-0.5) L17(3.5,-0.5) L18(4,-0.5) L19(4.5,-0.5) M1(-4.5,-1) M2(-4,-1) M3(-3.5,-1) M4(-3,-1) M5(-2.5,-1) M6(-2,-1) M7(-1.5,-1) M8(-1,-1) M9(-0.5,-1) M10(0,-1) M11(0.5,-1) M12(1,-1) M13(1.5,-1) M14(2,-1) M15(2.5,-1) M16(3,-1) M17(3.5,-1) M18(4,-1) M19(4.5,-1) N1(-4.5,-1.5) N2(-4,-1.5) N3(-3.5,-1.5) N4(-3,-1.5) N5(-2.5,-1.5) N6(-2,-1.5) N7(-1.5,-1.5) N8(-1,-1.5) N9(-0.5,-1.5) N10(0,-1.5) N11(0.5,-1.5) N12(1,-1.5) N13(1.5,-1.5) N14(2,-1.5) N15(2.5,-1.5) N16(3,-1.5) N17(3.5,-1.5) N18(4,-1.5) N19(4.5,-1.5) P1(-4.5,-2) P2(-4,-2) P3(-3.5,-2) P4(-3,-2) P5(-2.5,-2) P6(-2,-2) P7(-1.5,-2) P8(-1,-2) P9(-0.5,-2) P10(0,-2) P11(0.5,-2) P12(1,-2) P13(1.5,-2) P14(2,-2) P15(2.5,-2) P16(3,-2) P17(3.5,-2) P18(4,-2) P19(4.5,-2) R1(-4.5,-2.5) R2(-4,-2.5) R3(-3.5,-2.5) R4(-3,-2.5) R5(-2.5,-2.5) R6(-2,-2.5) R7(-1.5,-2.5) R8(-1,-2.5) R9(-0.5,-2.5) R10(0,-2.5) R11(0.5,-2.5) R12(1,-2.5) R13(1.5,-2.5) R14(2,-2.5) R15(2.5,-2.5) R16(3,-2.5) R17(3.5,-2.5) R18(4,-2.5) R19(4.5,-2.5) T1(-4.5,-3) T2(-4,-3) T3(-3.5,-3) T4(-3,-3) T5(-2.5,-3) T6(-2,-3) T7(-1.5,-3) T8(-1,-3) T9(-0.5,-3) T10(0,-3) T11(0.5,-3) T12(1,-3) T13(1.5,-3) T14(2,-3) T15(2.5,-3) T16(3,-3) T17(3.5,-3) T18(4,-3) T19(4.5,-3) U1(-4.5,-3.5) U2(-4,-3.5) U3(-3.5,-3.5) U4(-3,-3.5) U5(-2.5,-3.5) U6(-2,-3.5) U7(-1.5,-3.5) U8(-1,-3.5) U9(-0.5,-3.5) U10(0,-3.5) U11(0.5,-3.5) U12(1,-3.5) U13(1.5,-3.5) U14(2,-3.5) U15(2.5,-3.5) U16(3,-3.5) U17(3.5,-3.5) U18(4,-3.5) U19(4.5,-3.5) V1(-4.5,-4) V2(-4,-4) V3(-3.5,-4) V4(-3,-4) V5(-2.5,-4) V6(-2,-4) V7(-1.5,-4) V8(-1,-4) V9(-0.5,-4) V10(0,-4) V11(0.5,-4) V12(1,-4) V13(1.5,-4) V14(2,-4) V15(2.5,-4) V16(3,-4) V17(3.5,-4) V18(4,-4) V19(4.5,-4) W1(-4.5,-4.5) W2(-4,-4.5) W3(-3.5,-4.5) W4(-3,-4.5) W5(-2.5,-4.5) W6(-2,-4.5) W7(-1.5,-4.5) W8(-1,-4.5) W9(-0.5,-4.5) W10(0,-4.5) W11(0.5,-4.5) W12(1,-4.5) W13(1.5,-4.5) W14(2,-4.5) W15(2.5,-4.5) W16(3,-4.5) W17(3.5,-4.5) W18(4,-4.5) W19(4.5,-4.5)
F.SilkS:
  region: -5.11,5.11 -5.61,5.11 -5.11,5.61
  lines w0.254: -5.11,4.11 -5.11,-5.11 5.11,-5.11 5.11,5.11 -4.11,5.11
Top Component Center:
  lines w0.127: -0.127,0 0.127,0 -0.127,0 ; 0,-0.127 0,0.127 0,-0.127
Top Assembly:
  lines w0.254: -5,-5 -5,4 -4,5 5,5 5,-5 -5,-5
Top Courtyard:
  lines w0.254: -6,-6 -6,6 6,6 6,-6 -6,-6
Top Designator:
  text ".Designator" at -3.432,-0.345 h1.52

## ST_VFBGA-424_14x14mm_Layout27x27_P0.5mmP0.5x0.5mm_Stagger [mm] "ST_VFBGA-424_14x14mm_Layout27x27_P0.5mmP0.5x0.5mm_Stagger"
pads (424):
  round 0.25 smd: 1A1(-2.75,2.75) 1A3(-1.75,2.75) 1A5(-0.75,2.75) 1A7(0.25,2.75) 1A9(1.25,2.75) 1A11(2.25,2.75) 1B2(-2.25,2.25) 1B4(-1.25,2.25) 1B6(-0.25,2.25) 1B8(0.75,2.25) 1B10(1.75,2.25) 1B12(2.75,2.25) 1C1(-2.75,1.75) 1C3(-1.75,1.75) 1C5(-0.75,1.75) 1C7(0.25,1.75) 1C9(1.25,1.75) 1C11(2.25,1.75) 1D2(-2.25,1.25) 1D4(-1.25,1.25) 1D6(-0.25,1.25) 1D8(0.75,1.25) 1D10(1.75,1.25) 1D12(2.75,1.25) 1E1(-2.75,0.75) 1E3(-1.75,0.75) 1E5(-0.75,0.75) 1E7(0.25,0.75) 1E9(1.25,0.75) 1E11(2.25,0.75) 1F2(-2.25,0.25) 1F4(-1.25,0.25) 1F6(-0.25,0.25) 1F8(0.75,0.25) 1F10(1.75,0.25) 1F12(2.75,0.25) 1G1(-2.75,-0.25) 1G3(-1.75,-0.25) 1G5(-0.75,-0.25) 1G7(0.25,-0.25) 1G9(1.25,-0.25) 1G11(2.25,-0.25) 1H2(-2.25,-0.75) 1H4(-1.25,-0.75) 1H6(-0.25,-0.75) 1H8(0.75,-0.75) 1H10(1.75,-0.75) 1H12(2.75,-0.75) 1J1(-2.75,-1.25) 1J3(-1.75,-1.25) 1J5(-0.75,-1.25) 1J7(0.25,-1.25) 1J9(1.25,-1.25) 1J11(2.25,-1.25) 1K2(-2.25,-1.75) 1K4(-1.25,-1.75) 1K6(-0.25,-1.75) 1K8(0.75,-1.75) 1K10(1.75,-1.75) 1K12(2.75,-1.75) 1L1(-2.75,-2.25) 1L3(-1.75,-2.25) 1L5(-0.75,-2.25) 1L7(0.25,-2.25) 1L9(1.25,-2.25) 1L11(2.25,-2.25) 1M2(-2.25,-2.75) 1M4(-1.25,-2.75) 1M6(-0.25,-2.75) 1M8(0.75,-2.75) 1M10(1.75,-2.75) 1M12(2.75,-2.75) A1(-6.5,6.5) A2(-6,6.5) A3(-5.5,6.5) A6(-4,6.5) A7(-3.5,6.5) A10(-2,6.5) A11(-1.5,6.5) A14(0,6.5) A15(0.5,6.5) A18(2,6.5) A19(2.5,6.5) A22(4,6.5) A23(4.5,6.5) A26(6,6.5) A27(6.5,6.5) AA1(-6.5,-3.5) AA2(-6,-3.5) AA3(-5.5,-3.5) AA5(-4.5,-3.5) AA7(-3.5,-3.5) AA9(-2.5,-3.5) AA11(-1.5,-3.5) AA13(-0.5,-3.5) AA15(0.5,-3.5) AA17(1.5,-3.5) AA19(2.5,-3.5) AA21(3.5,-3.5) AA23(4.5,-3.5) AA25(5.5,-3.5) AA26(6,-3.5) AB1(-6.5,-4) AB2(-6,-4) AB3(-5.5,-4) AB4(-5,-4) AB6(-4,-4) AB8(-3,-4) AB10(-2,-4) AB12(-1,-4) AB14(0,-4) AB16(1,-4) AB18(2,-4) AB20(3,-4) AB22(4,-4) AB24(5,-4) AB25(5.5,-4) AB26(6,-4) AB27(6.5,-4) AC2(-6,-4.5) AC3(-5.5,-4.5) AC5(-4.5,-4.5) AC7(-3.5,-4.5) AC9(-2.5,-4.5) AC11(-1.5,-4.5) AC13(-0.5,-4.5) AC15(0.5,-4.5) AC17(1.5,-4.5) AC19(2.5,-4.5) AC21(3.5,-4.5) AC23(4.5,-4.5) AC25(5.5,-4.5) AC26(6,-4.5) AC27(6.5,-4.5) AD3(-5.5,-5) AD4(-5,-5) AD6(-4,-5) AD8(-3,-5) AD10(-2,-5) AD12(-1,-5) AD14(0,-5) AD16(1,-5) AD18(2,-5) AD20(3,-5) AD22(4,-5) AD24(5,-5) AD25(5.5,-5) AE1(-6.5,-5.5) AE2(-6,-5.5) AE3(-5.5,-5.5) AE4(-5,-5.5) AE5(-4.5,-5.5) AE6(-4,-5.5) AE7(-3.5,-5.5) AE8(-3,-5.5) AE9(-2.5,-5.5) AE10(-2,-5.5) AE11(-1.5,-5.5) AE12(-1,-5.5) AE13(-0.5,-5.5) AE14(0,-5.5) AE15(0.5,-5.5) AE16(1,-5.5) AE17(1.5,-5.5) AE18(2,-5.5) AE19(2.5,-5.5) AE20(3,-5.5) AE21(3.5,-5.5) AE22(4,-5.5) AE23(4.5,-5.5) AE24(5,-5.5) AE25(5.5,-5.5) AE26(6,-5.5) AF1(-6.5,-6) AF2(-6,-6) AF3(-5.5,-6) AF5(-4.5,-6) AF6(-4,-6) AF7(-3.5,-6) AF9(-2.5,-6) AF10(-2,-6) AF11(-1.5,-6) AF13(-0.5,-6) AF14(0,-6) AF15(0.5,-6) AF17(1.5,-6) AF18(2,-6) AF19(2.5,-6) AF21(3.5,-6) AF22(4,-6) AF23(4.5,-6) AF25(5.5,-6) AF26(6,-6) AF27(6.5,-6) AG1(-6.5,-6.5) AG2(-6,-6.5) AG5(-4.5,-6.5) AG6(-4,-6.5) AG9(-2.5,-6.5) AG10(-2,-6.5) AG13(-0.5,-6.5) AG14(0,-6.5) AG17(1.5,-6.5) AG18(2,-6.5) AG21(3.5,-6.5) AG22(4,-6.5) AG25(5.5,-6.5) AG26(6,-6.5) AG27(6.5,-6.5) B1(-6.5,6) B2(-6,6) B3(-5.5,6) B5(-4.5,6) B6(-4,6) B7(-3.5,6) B9(-2.5,6) B10(-2,6) B11(-1.5,6) B13(-0.5,6) B14(0,6) B15(0.5,6) B17(1.5,6) B18(2,6) B19(2.5,6) B21(3.5,6) B22(4,6) B23(4.5,6) B25(5.5,6) B26(6,6) B27(6.5,6) C2(-6,5.5) C3(-5.5,5.5) C4(-5,5.5) C5(-4.5,5.5) C6(-4,5.5) C7(-3.5,5.5) C8(-3,5.5) C9(-2.5,5.5) C10(-2,5.5) C11(-1.5,5.5) C12(-1,5.5) C13(-0.5,5.5) C14(0,5.5) C15(0.5,5.5) C16(1,5.5) C17(1.5,5.5) C18(2,5.5) C19(2.5,5.5) C20(3,5.5) C21(3.5,5.5) C22(4,5.5) C23(4.5,5.5) C24(5,5.5) C25(5.5,5.5) C26(6,5.5) C27(6.5,5.5) D3(-5.5,5) D4(-5,5) D6(-4,5) D8(-3,5) D10(-2,5) D12(-1,5) D14(0,5) D16(1,5) D18(2,5) D20(3,5) D22(4,5) D24(5,5) D25(5.5,5) E1(-6.5,4.5) E2(-6,4.5) E3(-5.5,4.5) E5(-4.5,4.5) E7(-3.5,4.5) E9(-2.5,4.5) E11(-1.5,4.5) E13(-0.5,4.5) E15(0.5,4.5) E17(1.5,4.5) E19(2.5,4.5) E21(3.5,4.5) E23(4.5,4.5) E25(5.5,4.5) E26(6,4.5) F1(-6.5,4) F2(-6,4) F3(-5.5,4) F4(-5,4) F6(-4,4) F8(-3,4) F10(-2,4) F12(-1,4) F14(0,4) F16(1,4) F18(2,4) F20(3,4) F22(4,4) F24(5,4) F25(5.5,4) F26(6,4) F27(6.5,4) G2(-6,3.5) G3(-5.5,3.5) G5(-4.5,3.5) G7(-3.5,3.5) G9(-2.5,3.5) G11(-1.5,3.5) G13(-0.5,3.5) G15(0.5,3.5) G17(1.5,3.5) G19(2.5,3.5) G21(3.5,3.5) G23(4.5,3.5) G25(5.5,3.5) G26(6,3.5) G27(6.5,3.5) H3(-5.5,3) H4(-5,3) H6(-4,3) H22(4,3) H24(5,3) H25(5.5,3) J1(-6.5,2.5) J2(-6,2.5) J3(-5.5,2.5) J5(-4.5,2.5) J7(-3.5,2.5) J21(3.5,2.5) J23(4.5,2.5) J25(5.5,2.5) J26(6,2.5) K1(-6.5,2) K2(-6,2) K3(-5.5,2) K4(-5,2) K6(-4,2) K22(4,2) K24(5,2) K25(5.5,2) K26(6,2) K27(6.5,2) L2(-6,1.5) L3(-5.5,1.5) L5(-4.5,1.5) L7(-3.5,1.5) L21(3.5,1.5) L23(4.5,1.5) L25(5.5,1.5) L26(6,1.5) L27(6.5,1.5) M3(-5.5,1) M4(-5,1) M6(-4,1) M22(4,1) M24(5,1) M25(5.5,1) N1(-6.5,0.5) N2(-6,0.5) N3(-5.5,0.5) N5(-4.5,0.5) N7(-3.5,0.5) N21(3.5,0.5) N23(4.5,0.5) N25(5.5,0.5) N26(6,0.5) P1(-6.5,0) P2(-6,0) P3(-5.5,0) P4(-5,0) P6(-4,0) P22(4,0) P24(5,0) P25(5.5,0) P26(6,0) P27(6.5,0) R2(-6,-0.5) R3(-5.5,-0.5) R5(-4.5,-0.5) R7(-3.5,-0.5) R21(3.5,-0.5) R23(4.5,-0.5) R25(5.5,-0.5) R26(6,-0.5) R27(6.5,-0.5) T3(-5.5,-1) T4(-5,-1) T6(-4,-1) T22(4,-1) T24(5,-1) T25(5.5,-1) U1(-6.5,-1.5) U2(-6,-1.5) U3(-5.5,-1.5) U5(-4.5,-1.5) U7(-3.5,-1.5) U21(3.5,-1.5) U23(4.5,-1.5) U25(5.5,-1.5) U26(6,-1.5) V1(-6.5,-2) V2(-6,-2) V3(-5.5,-2) V4(-5,-2) V6(-4,-2) V22(4,-2) V24(5,-2) V25(5.5,-2) V26(6,-2) V27(6.5,-2) W2(-6,-2.5) W3(-5.5,-2.5) W5(-4.5,-2.5) W7(-3.5,-2.5) W21(3.5,-2.5) W23(4.5,-2.5) W25(5.5,-2.5) W26(6,-2.5) W27(6.5,-2.5) Y3(-5.5,-3) Y4(-5,-3) Y6(-4,-3) Y22(4,-3) Y24(5,-3) Y25(5.5,-3)
F.SilkS:
  region: -7.11,7.11 -7.61,7.11 -7.11,7.61
  lines w0.254: -7.11,6.11 -7.11,-7.11 7.11,-7.11 7.11,7.11 -6.11,7.11
Top Component Center:
  lines w0.127: -0.127,0 0.127,0 -0.127,0 ; 0,-0.127 0,0.127 0,-0.127
Top Assembly:
  lines w0.254: -7,-7 7,-7 7,7 -6,7 -7,6 -7,-7
Top Courtyard:
  lines w0.254: -8,-8 8,-8 8,8 -8,8 -8,-8
Top Designator:
  text ".Designator" at -3.432,-0.345 h1.52

## Texas_BGA-289_15x15mm_Layout17x17_P0.8mm [mm] "Texas_BGA-289_15x15mm_Layout17x17_P0.8mm"
pads (289):
  round 0.4 smd: A1(-6.4,6.4) A2(-5.6,6.4) A3(-4.8,6.4) A4(-4,6.4) A5(-3.2,6.4) A6(-2.4,6.4) A7(-1.6,6.4) A8(-0.8,6.4) A9(0,6.4) A10(0.8,6.4) A11(1.6,6.4) A12(2.4,6.4) A13(3.2,6.4) A14(4,6.4) A15(4.8,6.4) A16(5.6,6.4) A17(6.4,6.4) B1(-6.4,5.6) B2(-5.6,5.6) B3(-4.8,5.6) B4(-4,5.6) B5(-3.2,5.6) B6(-2.4,5.6) B7(-1.6,5.6) B8(-0.8,5.6) B9(0,5.6) B10(0.8,5.6) B11(1.6,5.6) B12(2.4,5.6) B13(3.2,5.6) B14(4,5.6) B15(4.8,5.6) B16(5.6,5.6) B17(6.4,5.6) C1(-6.4,4.8) C2(-5.6,4.8) C3(-4.8,4.8) C4(-4,4.8) C5(-3.2,4.8) C6(-2.4,4.8) C7(-1.6,4.8) C8(-0.8,4.8) C9(0,4.8) C10(0.8,4.8) C11(1.6,4.8) C12(2.4,4.8) C13(3.2,4.8) C14(4,4.8) C15(4.8,4.8) C16(5.6,4.8) C17(6.4,4.8) D1(-6.4,4) D2(-5.6,4) D3(-4.8,4) D4(-4,4) D5(-3.2,4) D6(-2.4,4) D7(-1.6,4) D8(-0.8,4) D9(0,4) D10(0.8,4) D11(1.6,4) D12(2.4,4) D13(3.2,4) D14(4,4) D15(4.8,4) D16(5.6,4) D17(6.4,4) E1(-6.4,3.2) E2(-5.6,3.2) E3(-4.8,3.2) E4(-4,3.2) E5(-3.2,3.2) E6(-2.4,3.2) E7(-1.6,3.2) E8(-0.8,3.2) E9(0,3.2) E10(0.8,3.2) E11(1.6,3.2) E12(2.4,3.2) E13(3.2,3.2) E14(4,3.2) E15(4.8,3.2) E16(5.6,3.2) E17(6.4,3.2) F1(-6.4,2.4) F2(-5.6,2.4) F3(-4.8,2.4) F4(-4,2.4) F5(-3.2,2.4) F6(-2.4,2.4) F7(-1.6,2.4) F8(-0.8,2.4) F9(0,2.4) F10(0.8,2.4) F11(1.6,2.4) F12(2.4,2.4) F13(3.2,2.4) F14(4,2.4) F15(4.8,2.4) F16(5.6,2.4) F17(6.4,2.4) G1(-6.4,1.6) G2(-5.6,1.6) G3(-4.8,1.6) G4(-4,1.6) G5(-3.2,1.6) G6(-2.4,1.6) G7(-1.6,1.6) G8(-0.8,1.6) G9(0,1.6) G10(0.8,1.6) G11(1.6,1.6) G12(2.4,1.6) G13(3.2,1.6) G14(4,1.6) G15(4.8,1.6) G16(5.6,1.6) G17(6.4,1.6) H1(-6.4,0.8) H2(-5.6,0.8) H3(-4.8,0.8) H4(-4,0.8) H5(-3.2,0.8) H6(-2.4,0.8) H7(-1.6,0.8) H8(-0.8,0.8) H9(0,0.8) H10(0.8,0.8) H11(1.6,0.8) H12(2.4,0.8) H13(3.2,0.8) H14(4,0.8) H15(4.8,0.8) H16(5.6,0.8) H17(6.4,0.8) J1(-6.4,0) J2(-5.6,0) J3(-4.8,0) J4(-4,0) J5(-3.2,0) J6(-2.4,0) J7(-1.6,0) J8(-0.8,0) J9(0,0) J10(0.8,0) J11(1.6,0) J12(2.4,0) J13(3.2,0) J14(4,0) J15(4.8,0) J16(5.6,0) J17(6.4,0) K1(-6.4,-0.8) K2(-5.6,-0.8) K3(-4.8,-0.8) K4(-4,-0.8) K5(-3.2,-0.8) K6(-2.4,-0.8) K7(-1.6,-0.8) K8(-0.8,-0.8) K9(0,-0.8) K10(0.8,-0.8) K11(1.6,-0.8) K12(2.4,-0.8) K13(3.2,-0.8) K14(4,-0.8) K15(4.8,-0.8) K16(5.6,-0.8) K17(6.4,-0.8) L1(-6.4,-1.6) L2(-5.6,-1.6) L3(-4.8,-1.6) L4(-4,-1.6) L5(-3.2,-1.6) L6(-2.4,-1.6) L7(-1.6,-1.6) L8(-0.8,-1.6) L9(0,-1.6) L10(0.8,-1.6) L11(1.6,-1.6) L12(2.4,-1.6) L13(3.2,-1.6) L14(4,-1.6) L15(4.8,-1.6) L16(5.6,-1.6) L17(6.4,-1.6) M1(-6.4,-2.4) M2(-5.6,-2.4) M3(-4.8,-2.4) M4(-4,-2.4) M5(-3.2,-2.4) M6(-2.4,-2.4) M7(-1.6,-2.4) M8(-0.8,-2.4) M9(0,-2.4) M10(0.8,-2.4) M11(1.6,-2.4) M12(2.4,-2.4) M13(3.2,-2.4) M14(4,-2.4) M15(4.8,-2.4) M16(5.6,-2.4) M17(6.4,-2.4) N1(-6.4,-3.2) N2(-5.6,-3.2) N3(-4.8,-3.2) N4(-4,-3.2) N5(-3.2,-3.2) N6(-2.4,-3.2) N7(-1.6,-3.2) N8(-0.8,-3.2) N9(0,-3.2) N10(0.8,-3.2) N11(1.6,-3.2) N12(2.4,-3.2) N13(3.2,-3.2) N14(4,-3.2) N15(4.8,-3.2) N16(5.6,-3.2) N17(6.4,-3.2) P1(-6.4,-4) P2(-5.6,-4) P3(-4.8,-4) P4(-4,-4) P5(-3.2,-4) P6(-2.4,-4) P7(-1.6,-4) P8(-0.8,-4) P9(0,-4) P10(0.8,-4) P11(1.6,-4) P12(2.4,-4) P13(3.2,-4) P14(4,-4) P15(4.8,-4) P16(5.6,-4) P17(6.4,-4) R1(-6.4,-4.8) R2(-5.6,-4.8) R3(-4.8,-4.8) R4(-4,-4.8) R5(-3.2,-4.8) R6(-2.4,-4.8) R7(-1.6,-4.8) R8(-0.8,-4.8) R9(0,-4.8) R10(0.8,-4.8) R11(1.6,-4.8) R12(2.4,-4.8) R13(3.2,-4.8) R14(4,-4.8) R15(4.8,-4.8) R16(5.6,-4.8) R17(6.4,-4.8) T1(-6.4,-5.6) T2(-5.6,-5.6) T3(-4.8,-5.6) T4(-4,-5.6) T5(-3.2,-5.6) T6(-2.4,-5.6) T7(-1.6,-5.6) T8(-0.8,-5.6) T9(0,-5.6) T10(0.8,-5.6) T11(1.6,-5.6) T12(2.4,-5.6) T13(3.2,-5.6) T14(4,-5.6) T15(4.8,-5.6) T16(5.6,-5.6) T17(6.4,-5.6) U1(-6.4,-6.4) U2(-5.6,-6.4) U3(-4.8,-6.4) U4(-4,-6.4) U5(-3.2,-6.4) U6(-2.4,-6.4) U7(-1.6,-6.4) U8(-0.8,-6.4) U9(0,-6.4) U10(0.8,-6.4) U11(1.6,-6.4) U12(2.4,-6.4) U13(3.2,-6.4) U14(4,-6.4) U15(4.8,-6.4) U16(5.6,-6.4) U17(6.4,-6.4)
F.SilkS:
  region: -7.61,7.61 -8.11,7.61 -7.61,8.11
  lines w0.254: -7.61,6.61 -7.61,-7.61 7.61,-7.61 7.61,7.61 -6.61,7.61
Top Component Center:
  lines w0.127: -0.127,0 0.127,0 -0.127,0 ; 0,-0.127 0,0.127 0,-0.127
Top Assembly:
  lines w0.254: -7.5,-7.5 -7.5,6.5 -6.5,7.5 7.5,7.5 7.5,-7.5 -7.5,-7.5
Top Courtyard:
  lines w0.254: -8.5,-8.5 -8.5,8.5 8.5,8.5 8.5,-8.5 -8.5,-8.5
Top Designator:
  text ".Designator" at -3.432,-0.345 h1.52
3D body "Texas_BGA-289_15x15mm_Layout17x17_P0.8mm.step": height 1.38, standoff -0.03, extent -7.5,-7.5 7.5,7.5

## Texas_DSBGA-5_0.822x1.116mm_Layout2x1x2_P0.4mm [mm] "Texas_DSBGA-5_0.822x1.116mm_Layout2x1x2_P0.4mm"
pads (10):
  round 0.225 smd: A1(-0.2,0.346) A3(0.2,0.346) B2(0,0) C1(-0.2,-0.346) C3(0.2,-0.346)
  rect 0.25x0.25 on Top Paste: Un1(-0.2,0.346) Un2(-0.2,-0.346) Un3(0,0) Un4(0.2,0.346) Un5(0.2,-0.346)
F.SilkS:
  region: -0.531,0.678 -1.031,0.678 -0.531,1.178
  lines w0.254: -0.531,0.358 -0.531,-0.678 0.531,-0.678 0.531,0.678 -0.211,0.678
Top Component Center:
  lines w0.127: -0.127,0 0.127,0 -0.127,0 ; 0,-0.127 0,0.127 0,-0.127
Top Assembly:
  lines w0.254: -0.411,-0.558 0.411,-0.558 0.411,0.558 -0.211,0.558 -0.411,0.358 -0.411,-0.558
Top Courtyard:
  lines w0.254: -1.42,-1.56 1.42,-1.56 1.42,1.56 -1.42,1.56 -1.42,-1.56
Top Designator:
  text ".Designator" at -2.253,-0.226 h1

## Texas_DSBGA-5_0.8875x1.3875mm_Layout2x3_P0.5mm [mm] "Texas_DSBGA-5_0.8875x1.3875mm_Layout2x3_P0.5mm"
pads (5):
  round 0.23 smd: A1(-0.25,0.5) A2(0.25,0.5) B1(-0.25,0) C1(-0.25,-0.5) C2(0.25,-0.5)
F.SilkS:
  region: -0.625,0.875 -1.125,0.875 -0.625,1.375
  lines w0.254: -0.625,0.617 -0.625,-0.875 0.625,-0.875 0.625,0.875 -0.367,0.875
Top Component Center:
  lines w0.127: -0.127,0 0.127,0 -0.127,0 ; 0,-0.127 0,0.127 0,-0.127
Top Assembly:
  lines w0.254: -0.444,-0.694 -0.444,0.472 -0.222,0.694 0.444,0.694 0.444,-0.694 -0.444,-0.694
Top Courtyard:
  lines w0.254: -1.45,-1.7 -1.45,1.7 1.45,1.7 1.45,-1.7 -1.45,-1.7
Top Designator:
  text ".Designator" at -2.253,-0.226 h1

## Texas_DSBGA-5_1.5855x1.6365mm_Layout3x2_P0.5mm [mm] "Texas_DSBGA-5_1.5855x1.6365mm_Layout3x2_P0.5mm"
pads (5):
  round 0.16 smd: A1(-0.5,0.5) A2(0,0.5) A3(0.5,0.5) B1(-0.5,-0.5) B3(0.5,-0.5)
F.SilkS:
  region: -0.9,0.93 -1.4,0.93 -0.9,1.43
  lines w0.254: -0.903,0.572 -0.903,-0.928 0.903,-0.928 0.903,0.928 ; -0.525,0.928 0.875,0.928
Top Component Center:
  lines w0.127: -0.127,0 0.127,0 -0.127,0 ; 0,-0.127 0,0.127 0,-0.127
Top Assembly:
  lines w0.254: -0.793,-0.818 0.793,-0.818 0.793,0.818 -0.396,0.818 -0.793,0.422 -0.793,-0.818
Top Courtyard:
  lines w0.254: -1.79,-1.82 1.79,-1.82 1.79,1.82 -1.79,1.82 -1.79,-1.82
Top Designator:
  text ".Designator" at -2.253,-0.226 h1